# Altium integrated library connector8.IntLib: 1 symbol
Pins are listed as number, name and electrical type; pins without a type are passive.

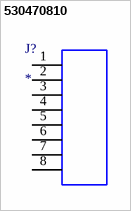
[diagram p0: symbol 530470810]

## 530470810
designator J?
MP: 530470810; Package: None; Price: None; Value: *; Availability: Unavailable
footprint CONN08_530470810_MOL
pins: 1, 2, 3, 4, 5, 6, 7, 8